# Altium footprint library PcbLib1.PcbLib: 37 footprints (part 2 of 3)
Each footprint in its own frame and in the unit in brackets; x right, y up, seen from the top. Pads: shape width x height; smd on the part's side, far side on the other; paste and mask are expansions set on the pad; w line width, h text height; cw(c..) or ccw(c..) is an arc to the next point about the centre after c.
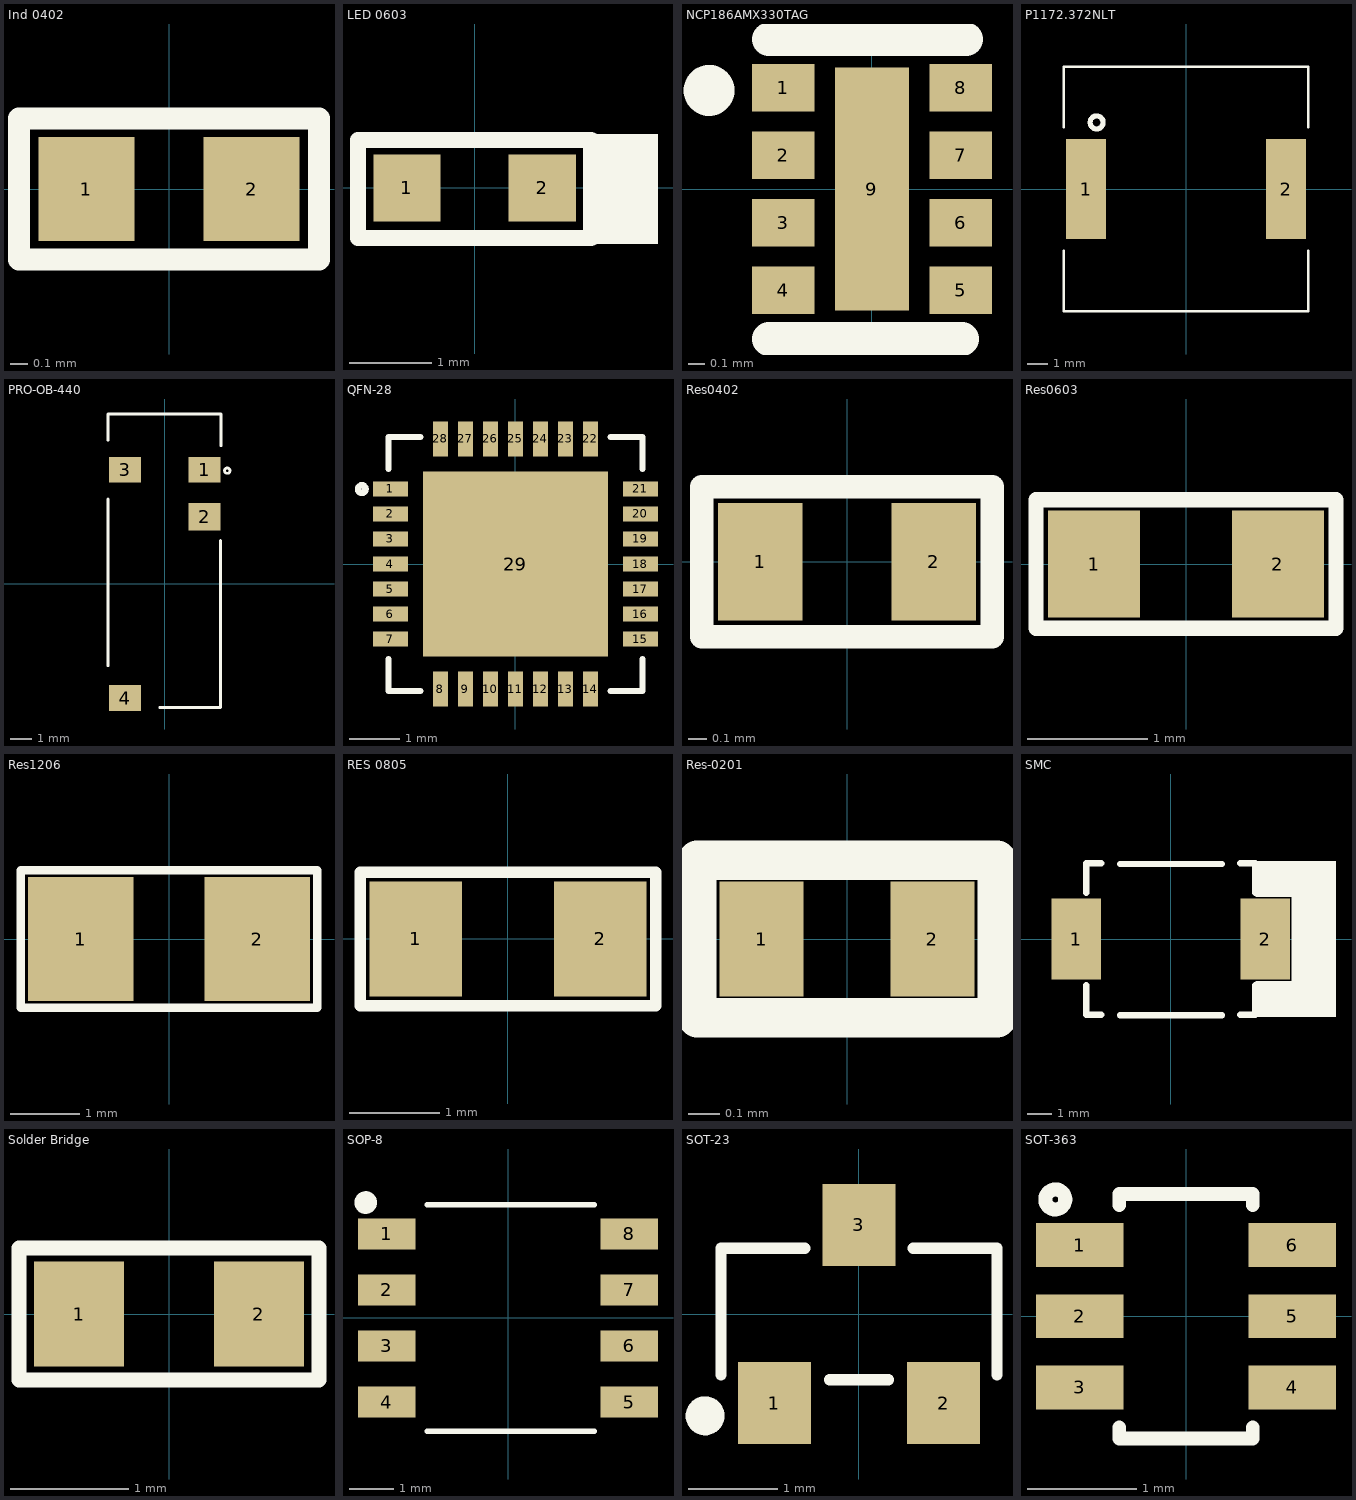
[diagram p1: the footprints below, top view; thin cyan lines are the x and y axes]

## Ind 0402 [mm]
pads (2):
  rect 0.55x0.6 smd: 1(-0.475,0) 2(0.475,0)
Top Overlay:
  lines w0.127: -0.864,-0.406 -0.864,0.406 0.864,0.406 0.864,-0.406 -0.864,-0.406
3D body "LQG15HN7N5J02D.STEP": height 0.48, standoff -0.02, extent -0.5,-0.279 0.5,0.271

## LED 0603 [mm]
pads (2):
  rect 0.82x0.82 smd: 1(-0.825,0) 2(0.825,0)
Top Overlay:
  region: 2.235,0.66 1.422,0.66 1.422,-0.686 2.235,-0.686
  lines w0.2: -1.422,-0.61 1.422,-0.61 1.422,0.584 -1.422,0.584 -1.422,-0.61
3D body "User Library-SMD LED 0603.step": height 0.38, standoff -0.01, extent -0.8,-0.4 0.8,0.4

## NCP186AMX330TAG [mm]
pads (9):
  rect 0.37x0.28 smd: 1(-0.525,0.6) 2(-0.525,0.2) 3(-0.525,-0.2) 4(-0.525,-0.6) 5(0.525,-0.6) 6(0.525,-0.2) 7(0.525,0.2) 8(0.525,0.6)
  rect 0.44x1.44 smd: 9(0,0)
Top Overlay:
  circle w0.2: c-0.965,0.584 r0.051
  lines w0.2: -0.61,-0.889 0.533,-0.889 ; -0.61,0.889 0.559,0.889
3D body ".stp": height 0.39, standoff -0.01, extent -0.6,-0.8 0.6,0.8

## P1172.372NLT [mm]
pads (2):
  rect 2x5 smd: 1(-5,0) 2(5,0)
Top Overlay:
  circle w0.254: c-4.47,3.327 r0.325
  lines w0.127: -6.12,-3.1 -6.12,-6.12 0,-6.12 6.12,-6.12 6.12,-3.1 ; -6.12,3.1 -6.12,6.12 0,6.12 6.12,6.12 6.12,3.1

## PRO-OB-440 [mm] "RF ANT 2.4GHZ STAMPED MET SLD"
pads (4):
  rect 1.5x1.2 smd: 1(1.865,5.35) 3(-1.865,5.35) 4(-1.865,-5.35)
  rect 1.5x1.28 smd: 2(1.865,3.15)
Top Overlay:
  circle w0.127: c2.921,5.309 r0.127
  lines w0.127: -2.667,-3.835 -2.667,3.975 ; -2.667,6.731 -2.667,7.963 2.629,7.963 2.629,6.477 ; -0.241,-5.791 2.603,-5.791 2.603,2.032
3D body "PRO-OB-440--3DModel-STEP-1.STEP": height 3.5, standoff -0.03, extent -2.615,-5.744 2.615,8.005

## QFN-28 [mm] "IC MTR DRV 4.75-28V QFN28"
pads (29):
  rect 0.7x0.3 smd: 1(-2.5,1.5) 2(-2.5,1) 3(-2.5,0.5) 4(-2.5,0) 5(-2.5,-0.5) 6(-2.5,-1) 7(-2.5,-1.5) 15(2.5,-1.5) 16(2.5,-1) 17(2.5,-0.5) 18(2.5,0) 19(2.5,0.5) 20(2.5,1) 21(2.5,1.5)
  rect 0.3x0.7 smd: 8(-1.5,-2.5) 9(-1,-2.5) 10(-0.5,-2.5) 11(0,-2.5) 12(0.5,-2.5) 13(1,-2.5) 14(1.5,-2.5) 22(1.5,2.5) 23(1,2.5) 24(0.5,2.5) 25(0,2.5) 26(-0.5,2.5) 27(-1,2.5) 28(-1.5,2.5)
  rect 3.7x3.7 smd: 29(0,0)
Top Overlay:
  circle w0.127: c-3.073,1.499 r0.076
  lines w0.127: -2.54,-1.905 -2.54,-2.54 -1.905,-2.54 ; -2.54,1.905 -2.54,2.54 -1.905,2.54 ; 1.905,-2.54 2.54,-2.54 2.54,-1.905 ; 1.905,2.54 2.54,2.54 2.54,1.905
3D body "QFN28_5X5_3X8_EPAD_TRI.step": height 0.89, standoff 0, extent -2.502,-2.502 2.502,2.502

## Res0402 [mil]
pads (2):
  rect 18x25 smd mask+4: 1(-18.5,0) 2(18.5,0)
Top Overlay:
  lines w0.13: -32,-17 32,-17
  lines w5: -31,-16 31,-16 31,16 -31,16 -31,-16
3D body "User Library-RES_1005-0402.step": height 16.14, standoff 0, extent -22.63,-10.82 22.64,10.83

## Res0603 [mil]
pads (2):
  rect 30x35 smd: 1(-30,0) 2(30,0)
Top Overlay:
  lines w5: -49,-21 49,-21 49,21 -49,21 -49,-21
3D body "User Library-RESC1608X05N.step": height 17.76, standoff 0, extent -30.52,-16.74 30.51,16.73

## Res1206 [mil]
pads (2):
  rect 60x70 smd: 1(-50,0) 2(50,0)
Top Overlay:
  lines w5: -84,-39 84,-39 84,39 -84,39 -84,-39
3D body "User Library-1206 SMD Resistor.step": height 39.45, standoff 0, extent -62.99,-31.49 63,31.51

## RES 0805 [mil] "SMD 0805"
pads (2):
  rect 40x50 smd: 1(-40,0) 2(40,0)
Top Overlay:
  lines w5: -64,-29 -64,29 64,29 64,-29 -64,-29
3D body "User Library-CR2012-0805.STEP": height 23.62, standoff 0, extent -39.34,-24.75 39.4,24.46

## Res-0201 [mm]
pads (2):
  rect 0.27x0.37 smd: 1(-0.275,0) 2(0.275,0)
Top Overlay:
  lines w0.127: -0.483,-0.254 0.483,-0.254 0.483,0.254 -0.483,0.254 -0.483,-0.254
3D body "User Library-0201(0603M) Res.step": height 0.29, standoff -0.02, extent -0.305,-0.152 0.305,0.153

## SMC [mm] "DO-214AB(SMC) (FS PKG Code P7)"
pads (2):
  rect 2x3.27 smd: 1(-3.835,0) 2(3.835,0)
Top Overlay:
  rectangle: 3.429,-3.175 6.706,-1.702
  rectangle: 4.902,-3.175 6.706,3.175
  rectangle: 3.429,1.702 6.706,3.175
  lines w0.254: -3.429,-1.88 -3.429,-3.073 -2.819,-3.073 ; -3.429,1.88 -3.429,3.073 -2.819,3.073 ; -2.057,-3.099 2.083,-3.099 ; -2.057,3.048 2.083,3.048 ; 2.819,-3.073 3.429,-3.073 3.429,-1.88 ; 2.819,3.073 3.429,3.073 3.429,1.88
3D body "User Library-DO-214AB-SMC.step": height 2.45, standoff 0, extent -3.9,-2.95 3.9,2.95

## Solder Bridge [mil] "Solder Bridge ON"
pads (2):
  rect 30x35 smd: 1(-30,0) 2(30,0)
Top Overlay:
  lines w5: -50,-22 50,-22 50,22 -50,22 -50,-22

## SOP-8 [mm]
pads (8):
  rect 1.3x0.7 smd: 1(-2.75,1.905) 2(-2.75,0.635) 3(-2.75,-0.635) 4(-2.75,-1.905) 5(2.75,-1.905) 6(2.75,-0.635) 7(2.75,0.635) 8(2.75,1.905)
Top Overlay:
  circle w0.254: c-3.226,2.616 r0.13
  lines w0.127: -1.829,-2.565 1.956,-2.565 ; -1.829,2.565 1.956,2.565
3D body "SOP-8.STEP": height 1.87, standoff 0, extent -3.11,-2.5 3.11,2.5

## SOT-23 [mm] "TRANS NPN 40V 0.6A SOT23"
pads (3):
  rect 0.82x0.92 smd: 1(-0.95,-1) 2(0.95,-1) 3(0,1)
Top Overlay:
  circle w0.254: c-1.727,-1.143 r0.092
  lines w0.127: -1.549,-0.686 -1.549,0.737 -0.61,0.737 ; -0.33,-0.737 0.33,-0.737 ; 0.61,0.737 1.549,0.737 1.549,-0.686
3D body "CircuitWorks-SOT-23.step": height 1.1, standoff 0, extent -1.5,-1.25 1.5,1.25

## SOT-363 [mm] "Dual Digital Transistors"
pads (6):
  rect 0.8x0.4 smd: 1(-0.97,0.65) 2(-0.97,0) 3(-0.97,-0.65) 4(0.97,-0.65) 5(0.97,0) 6(0.97,0.65)
Top Overlay:
  circle w0.127: c-1.194,1.067 r0.092
  lines w0.127: -0.61,-1.016 -0.61,-1.118 0.61,-1.118 0.61,-1.016 ; -0.61,1.016 -0.61,1.118 0.61,1.118 0.61,1.016
3D body "User Library-SOT363-2.STEP": height 1.08, standoff -0.02, extent -1.2,-1.1 1.2,1.1